# Altium footprint library Master.PcbLib: 178 footprints (part 1 of 12)
Each footprint in its own frame and in the unit in brackets; x right, y up, seen from the top. Pads: shape width x height; smd on the part's side, far side on the other; paste and mask are expansions set on the pad; w line width, h text height; cw(c..) or ccw(c..) is an arc to the next point about the centre after c.
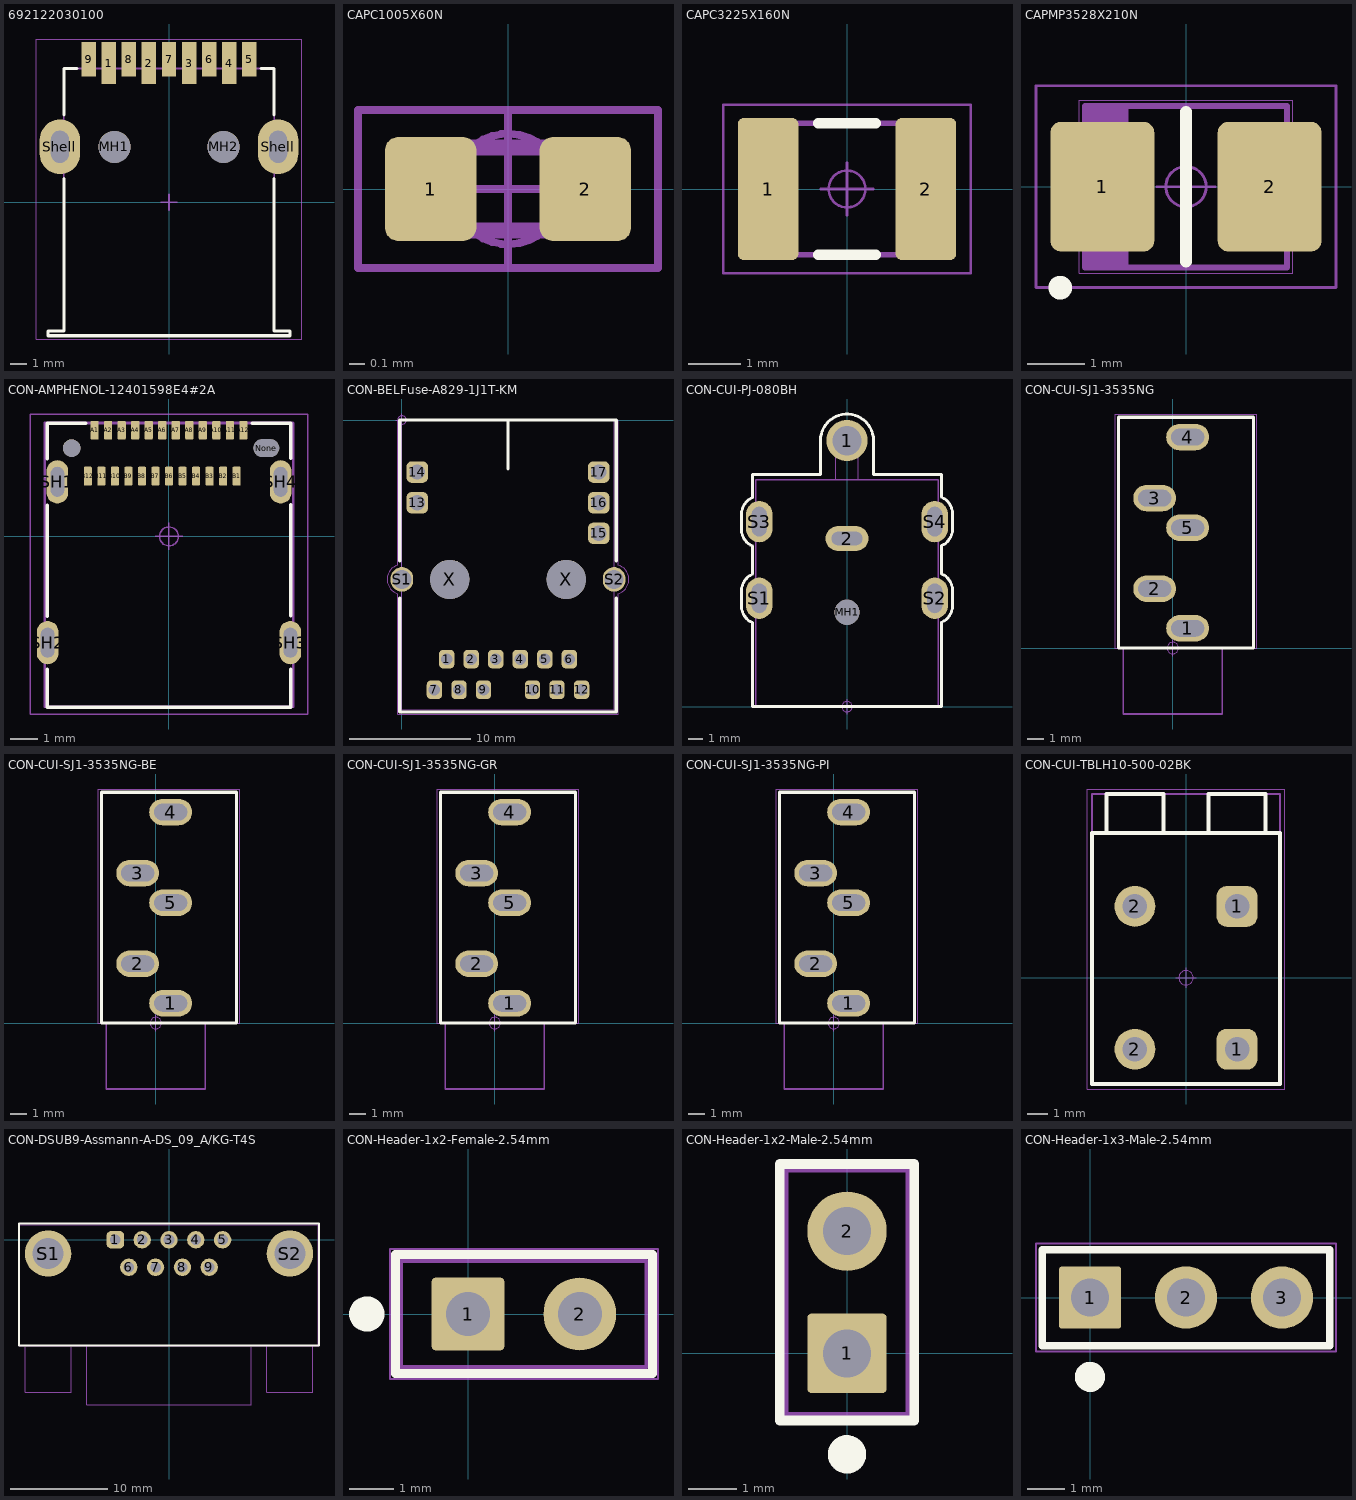
[diagram p0: the footprints below, top view; thin cyan lines are the x and y axes]

## 692122030100 [mm] "USB 3.0 Type A Horizontal SMD"
height 6.99
pads (13):
  rect 0.9x2.6 smd: 1(-3.75,8.67) 2(-1.25,8.67) 3(1.25,8.67) 4(3.75,8.67)
  rect 0.9x2.15 smd: 5(5,8.895) 6(2.5,8.895) 7(0,8.895) 8(-2.5,8.895) 9(-5,8.895)
  round 2 hole 2 unplated: MH1(-3.4,3.45) MH2(3.4,3.45)
  oval 2.52x3.4 hole 1.12 slot 2 at 90 deg: Shell(-6.8,3.45) Shell(6.8,3.45)
Top Overlay:
  lines w0.2: -6.55,1.47 -6.55,-8.03 -7.55,-8.03 -7.55,-8.33 7.55,-8.33 7.55,-8.03 6.55,-8.03 6.55,1.47 ; -6.55,5.43 -6.55,8.33 -5.75,8.33 ; 5.75,8.33 6.55,8.33 6.55,5.43
Top 3D Body:
  lines w0.1: -7.55,-8.33 7.55,-8.33 7.55,-8.03 6.55,-8.03 6.55,8.33 -6.55,8.33 -6.55,-8.03 -7.55,-8.03 -7.55,-8.33
Top Component Center:
  lines w0.1: -0.5,0 0.5,0 ; 0,-0.5 0,0.5
Top Assembly:
  lines w0.1: -5.25,8.33 -5.25,9.47 -4.75,9.47 -4.75,8.33 ; -4,8.33 -4,9.47 -3.5,9.47 -3.5,8.33 ; -2.75,8.33 -2.75,9.47 -2.25,9.47 -2.25,8.33 ; -1.5,8.33 -1.5,9.47 -1,9.47 -1,8.33 ; -0.25,8.33 -0.25,9.47 0.25,9.47 0.25,8.33 ; 1,8.33 1,9.47 1.5,9.47 1.5,8.33 ; 2.25,8.33 2.25,9.47 2.75,9.47 2.75,8.33 ; 3.5,8.33 3.5,9.47 4,9.47 4,8.33 ; 4.75,8.33 4.75,9.47 5.25,9.47 5.25,8.33 ; -7.55,-8.33 7.55,-8.33 7.55,-8.03 6.55,-8.03 6.55,8.33 -6.55,8.33 -6.55,-8.03 -7.55,-8.03 -7.55,-8.33
Top Designator:
  text ".Designator" at -3.647,-0.357 h1
Top Courtyard:
  lines w0.05: -8.26,-8.53 8.26,-8.53 8.26,10.17 -8.26,10.17 -8.26,-8.53
3D body "692122030100.stp": height 7.95, standoff -2.29, extent -7.55,-8.33 7.55,9.47

## CAPC1005X60N [mm]
pads (2):
  rrect30% 0.58x0.66 smd: 1(-0.49,0) 2(0.49,0)
Top Component Outline:
  lines w0.05: -0.95,-0.5 0.95,-0.5 0.95,0.5 -0.95,0.5 -0.95,-0.5
Top 3D Body:
  lines w0.001: -0.5,-0.25 0.5,-0.25 0.5,0.25 -0.5,0.25 -0.5,-0.25
Top Component Center:
  circle w0.05: c0,0 r0.35
  lines w0.05: -0.5,0 0.5,0 ; 0,-0.5 0,0.5
Top Dimensions:
  lines w0.1: -0.512,-0.262 0.512,-0.262 0.512,0.262 -0.512,0.262 -0.512,-0.262
Top Assembly:
  text ".Designator" at -1.575,0.8 h0.75
3D body "User Library-CAPC1005X06.step": height 0.6, standoff 0, extent -0.5,-0.25 0.5,0.25

## CAPC3225X160N [mm]
pads (2):
  rrect20% 1.15x2.7 smd: 1(-1.5,0) 2(1.5,0)
Top Overlay:
  lines w0.2: -0.55,-1.25 0.55,-1.25 ; -0.55,1.25 0.55,1.25
Top Component Outline:
  lines w0.05: -2.35,-1.6 2.35,-1.6 2.35,1.6 -2.35,1.6 -2.35,-1.6
Top 3D Body:
  lines w0.001: -1.6,-1.26 1.6,-1.26 1.6,1.26 -1.6,1.26 -1.6,-1.26
Top Component Center:
  circle w0.05: c0,0 r0.35
  lines w0.05: -0.5,0 0.5,0 ; 0,-0.5 0,0.5
Top Dimensions:
  lines w0.1: -1.6,-1.25 1.6,-1.25 1.6,1.25 -1.6,1.25 -1.6,-1.25
Top Assembly:
  text ".Designator" at -1.775,2 h0.75
3D body "User Library-CAPC3225X___.step": height 1.62, standoff 0, extent -1.6,-1.26 1.6,1.26

## CAPMP3528X210N [mm]
height 1.9
pads (2):
  rrect20% 1.8x2.25 smd: 1(-1.45,0) 2(1.45,0)
Top Overlay:
  circle w0.25: c-2.18,-1.75 r0.08
  lines w0.2: 0,-1.3 0,1.3
Top Component Outline:
  lines w0.05: -2.6,-1.75 -2.6,1.75 2.6,1.75 2.6,-1.75 -2.6,-1.75
Top 3D Body:
  lines w0.001: -1.85,-1.5 -1.85,1.5 1.85,1.5 1.85,-1.5 -1.85,-1.5
Top Component Center:
  circle w0.05: c0,0 r0.35
  lines w0.05: -0.5,0 0.5,0 ; 0,-0.5 0,0.5
Top Dimensions:
  lines w0.1: -1.65,-1.4 -1.65,1.4 ; -1.55,-1.4 -1.55,1.4 ; -1.45,-1.4 -1.45,1.4 ; -1.35,-1.4 -1.35,1.4 ; -1.25,-1.4 -1.25,1.4 ; -1.15,-1.4 -1.15,1.4 ; -1.05,-1.4 -1.05,1.4 ; -1.75,-1.4 -1.75,1.4 ; -1.75,-1.4 -1.75,1.4 ; -1.75,-1.4 1.75,-1.4 1.75,1.4 -1.75,1.4
Top Assembly:
  text ".Designator" at -1.689,-0.17 h0.75
3D body: height 1.9, standoff 0, extent -0.991,-1.5 1.85,1.5
3D body: height 1.9, standoff 0, extent -1.85,-1.5 -0.991,1.5

## CON-AMPHENOL-12401598E4#2A [mm] "USB 3.1 Gen 2, Input Output Connectors, USB type C, Receptacle, Top mount, dual-row SMT, 1.6mmPCB"
height 3.28
pads (30):
  rrect30% 0.3x0.7 smd mask+0.05: A1(-2.75,3.93) A2(-2.25,3.93) A3(-1.75,3.93) A4(-1.25,3.93) A5(-0.75,3.93) A6(-0.25,3.93) A7(0.25,3.93) A8(0.75,3.93) A9(1.25,3.93) A10(1.75,3.93) A11(2.25,3.93) A12(2.75,3.93) B1(2.5,2.23) B2(2,2.23) B3(1.5,2.23) B4(1,2.23) B5(0.5,2.23) B6(0,2.23) B7(-0.5,2.23) B8(-1,2.23) B9(-1.5,2.23) B10(-2,2.23) B11(-2.5,2.23) B12(-3,2.23)
  round 0.65 hole 0.65 unplated mask+0.05: None(-3.6,3.27)
  oval 0.95x0.65 hole 0.65 slot 0.95 at 0 deg unplated mask+0.05: None(3.6,3.27)
  oval 0.8x1.6 hole 0.5 slot 1.1 at 90 deg mask+0.05: SH1(-4.13,2.02) SH2(-4.49,-3.93) SH3(4.49,-3.93) SH4(4.13,2.02)
Top Overlay:
  lines w0.127: -4.5,-4.92 -4.5,-6.32 4.5,-6.32 4.5,-4.91 ; -4.5,-2.95 -4.5,1.15 ; -4.5,2.87 -4.5,4.18 -3.08,4.18 ; 3.08,4.18 4.5,4.18 4.5,2.89 ; 4.5,-2.94 4.5,1.17
Top Component Outline:
  lines w0.05: -5.14,-6.57 -5.14,4.53 5.14,4.53 5.14,-6.57 -5.14,-6.57
Top 3D Body:
  lines w0: -4.74,-4.23 ccw(c-4.49,-4.23) -4.24,-4.23 -4.24,-3.63 ccw(c-4.49,-3.63) -4.74,-3.63 -4.74,-4.23 ; -4.38,1.72 ccw(c-4.13,1.72) -3.88,1.72 -3.88,2.32 ccw(c-4.13,2.32) -4.38,2.32 -4.38,1.72 ; 3.88,1.72 ccw(c4.13,1.72) 4.38,1.72 4.38,2.32 ccw(c4.13,2.32) 3.88,2.32 3.88,1.72 ; 4.24,-4.23 ccw(c4.49,-4.23) 4.74,-4.23 4.74,-3.63 ccw(c4.49,-3.63) 4.24,-3.63 4.24,-4.23
  lines w0.001: -4.6,-6.305 4.6,-6.305 4.6,4.195 -4.6,4.195 -4.6,-6.305
Top Component Center:
  circle w0.05: c0,0 r0.35
  lines w0.05: -0.5,0 0.5,0 ; 0,-0.5 0,0.5
Top Dimensions:
  lines w0.1: -4.6,-6.3 -4.6,4.2 4.575,4.2 4.6,4.175 4.6,-6.3 -4.6,-6.3
Top Assembly:
  text ".Designator" at -0.454,-0.265 h0.75
3D body "12401598E4#2A--3DModel-STEP-56544.STEP": height 3.28, standoff -2.1, extent -4.6,-6.305 4.6,4.195

## CON-BELFuse-A829-1J1T-KM [mil]
pads (21):
  rrect50% 50x60 hole 38: 1(146,-779.68) 2(226,-779.68) 3(306,-779.68) 4(386,-779.68) 5(466,-779.68) 6(546,-779.68) 7(106,-879.68) 8(186,-879.68) 9(266,-879.68) 10(426,-879.68) 11(506,-879.68) 12(586,-879.68)
  rrect50% 70x70 hole 50: 13(50,-269.69) 14(50,-169.69) 15(642,-369.69) 16(642,-269.69) 17(642,-169.69)
  oval 74x80 hole 62: S1(0,-519.68) S2(692,-519.68)
  round 128 hole 128 unplated: X(156,-519.68) X(536,-519.68)
Top Overlay:
  lines w10: -6.95,-579.68 -6.95,-951.77 699.02,-951.77 699.02,-579.68 ; -6.95,-459.49 -6.95,0 699.02,0 699.02,-460 ; 346,-159.69 346,-0.06 346.06,0
Top Component Outline:
  lines w1.97: -13.78,-473.23 -13.78,0 705.91,0 705.91,-473.24 ; -13.76,-473.28 ccw(c0.2,-519.71) -13.78,-566.13 -13.78,-958.66 705.91,-958.66 705.91,-566.09 ; 705.89,-566.05 ccw(c691.8,-519.66) 705.89,-473.28
Top 3D Body:
  lines w0.04: 0,-944.88 0,0 692.13,0 692.13,-944.88 0,-944.88
Top Component Center:
  circle w1.97: c0,0 r13.78
  lines w1.97: -19.68,0 19.68,0 ; 0,-19.68 0,19.68
Top Dimensions:
  lines w3.94: 0,-944.88 0,0 692.13,0 692.13,-944.88 0,-944.88
Top Assembly:
  text ".Designator" at -61,25 h29.53
3D body "L829-1J1T-43.STEP": height 493.58, standoff -151.39, extent -54.94,-946.68 747.01,19.67

## CON-CUI-PJ-080BH [mm]
pads (7):
  round 2.8 hole 2: 1(0,18.05)
  oval 2.9x1.7 hole 0.9 slot 2.1 at 0 deg: 2(0,11.4)
  round 1.7 hole 1.7 unplated: MH1(0,6.4)
  oval 1.8x2.8 hole 1 slot 2 at 90 deg: S1(-5.95,7.35) S2(5.95,7.35) S3(-5.95,12.55) S4(5.95,12.55)
Top Overlay:
  lines w0.1: -6.399,14.182 -6.4,14.183
  lines w0.2: -6.4,5.691 cw(c-5.956,6.805) -7.156,6.805 -7.156,7.871 cw(c-5.956,7.867) -6.399,8.982 -6.4,10.891 cw(c-5.956,12.005) -7.156,12.005 -7.156,13.071 cw(c-5.956,13.067) -6.399,14.182 ; -6.4,5.693 -6.4,0 ; -6.4,14.183 -6.4,15.75 -1.8,15.75 -1.8,18.05 cw(c0,18.05) 1.8,18.05 1.8,15.75 6.4,15.75 6.4,14.209 cw(c5.956,13.095) 7.156,13.095 7.156,12.029 cw(c5.956,12.033) 6.399,10.918 6.4,9.009 cw(c5.956,7.895) 7.156,7.895 7.156,6.829 cw(c5.956,6.833) 6.399,5.718 6.4,0 ; -6.4,0 6.4,0 ; -6.4,0 6.4,0
Top Component Outline:
  lines w0.05: -6.4,5.691 cw(c-5.956,6.805) -7.156,6.805 -7.156,7.871 cw(c-5.956,7.867) -6.399,8.982 -6.4,10.891 cw(c-5.956,12.005) -7.156,12.005 -7.156,13.071 cw(c-5.956,13.067) -6.399,14.182 -6.399,15.747 -6.401,15.748 -1.803,15.748 -1.803,18.05 ; -6.4,5.693 -6.4,0 6.4,0 6.4,5.794 ; -1.8,18.05 cw(c0,18.05) 1.8,18.05 1.8,15.75 6.4,15.75 6.4,14.209 cw(c5.956,13.095) 7.156,13.095 7.156,12.029 cw(c5.956,12.033) 6.399,10.918 6.4,9.009 cw(c5.956,7.895) 7.156,7.895 7.156,6.829 cw(c5.956,6.833) 6.399,5.718
Top 3D Body:
  lines w0.001: -0.75,15.4 -0.75,15.425 -0.75,18.8 0.75,18.8 0.75,15.425 0.75,15.4 ; -6.2,0 -6.2,15.4 6.2,15.4 6.2,0 -6.2,0
Top Component Center:
  circle w0.05: c0,0 r0.35
  lines w0.05: -0.5,0 0.5,0 ; 0,-0.5 0,0.5
Top Dimensions:
  lines w0.1: -6.2,0 -6.2,15.4 6.2,15.4 6.2,0 -6.2,0
Top Assembly:
  text ".Designator" at -1.829,-0.965 h0.75
3D body "CUI_PJ-080BH.step": height 13.4, standoff -2.2, extent -6.3,0 6.3,18.8

## CON-CUI-SJ1-3535NG [mm]
pads (5):
  oval 2.6x1.6 hole 1 slot 2 at 0 deg: 1(0.9,1.2) 2(-1.1,3.6) 3(-1.1,9.1) 4(0.9,12.8) 5(0.9,7.3)
Top Overlay:
  lines w0.2: -3.3,0 4.9,0 4.9,14 -3.3,14 -3.3,0
Top Component Outline:
  lines w0.05: -3,0 3,0 ; -3,0 -3,-4 3,-4 3,0 ; -3,0 -3.5,0 -3.5,14.2 5.1,14.2 5.1,0 3,0
Top 3D Body:
  lines w0.01: -3,0 -3,-4 3,-4 3,0 ; -3.3,0 -3.3,14 4.9,14 4.9,0 -3.3,0
Top Component Center:
  circle w0.05: c0,0 r0.35
  lines w0.05: -0.5,0 0.5,0 ; 0,-0.5 0,0.5
Top Dimensions:
  lines w0.1: -3,0 -3,-4 3,-4 3,0 ; -3.3,0 4.9,0 4.9,14 -3.3,14 -3.3,0
Top Assembly:
  text ".Designator" at -1.6,14.402 h0.75
3D body "CUI_DEVICES_SJ1-3535NG.step": height 12.31, standoff -3.29, extent -3.3,-4.05 4.9,14

## CON-CUI-SJ1-3535NG-BE [mm]
pads (5):
  oval 2.6x1.6 hole 1 slot 2 at 0 deg: 1(0.9,1.2) 2(-1.1,3.6) 3(-1.1,9.1) 4(0.9,12.8) 5(0.9,7.3)
Top Overlay:
  lines w0.2: -3.3,0 4.9,0 4.9,14 -3.3,14 -3.3,0
Top Component Outline:
  lines w0.05: -3,0 -3,-4 3,-4 3,0 ; 3,0 -2.8,0 -3.5,0 -3.5,14.2 5.1,14.2 5.1,0 3,0
Top 3D Body:
  lines w0.01: -3,0 -3,-4 3,-4 3,0 ; -3.3,0 -3.3,14 4.9,14 4.9,0 -3.3,0
Top Component Center:
  circle w0.05: c0,0 r0.35
  lines w0.05: -0.5,0 0.5,0 ; 0,-0.5 0,0.5
Top Dimensions:
  lines w0.1: -3,0 -3,-4 3,-4 3,0 ; -3.3,0 4.9,0 4.9,14 -3.3,14 -3.3,0
Top Assembly:
  text ".Designator" at -1.6,14.402 h0.75
3D body "CUI_SJ1-3535NG-BE.step": height 12.4, standoff -3.2, extent -3.3,-4.05 4.9,14

## CON-CUI-SJ1-3535NG-GR [mm]
pads (5):
  oval 2.6x1.6 hole 1 slot 2 at 0 deg: 1(0.9,1.2) 2(-1.1,3.6) 3(-1.1,9.1) 4(0.9,12.8) 5(0.9,7.3)
Top Overlay:
  lines w0.2: -3.3,0 4.9,0 4.9,14 -3.3,14 -3.3,0
Top Component Outline:
  lines w0.05: -3,0 3,0 ; -3,0 -3,-4 3,-4 3,0 ; -3,0 -3.5,0 -3.5,14.2 5.1,14.2 5.1,0 3,0
Top 3D Body:
  lines w0.01: -3,0 -3,-4 3,-4 3,0 ; -3.3,0 -3.3,14 4.9,14 4.9,0 -3.3,0
Top Component Center:
  circle w0.05: c0,0 r0.35
  lines w0.05: -0.5,0 0.5,0 ; 0,-0.5 0,0.5
Top Dimensions:
  lines w0.1: -3,0 -3,-4 3,-4 3,0 ; -3.3,0 4.9,0 4.9,14 -3.3,14 -3.3,0
Top Assembly:
  text ".Designator" at -1.6,14.402 h0.75
3D body "CUI_SJ1-3535NG-GR.step": height 12.4, standoff -3.2, extent -3.3,-4.05 4.9,14

## CON-CUI-SJ1-3535NG-PI [mm]
pads (5):
  oval 2.6x1.6 hole 1 slot 2 at 0 deg: 1(0.9,1.2) 2(-1.1,3.6) 3(-1.1,9.1) 4(0.9,12.8) 5(0.9,7.3)
Top Overlay:
  lines w0.2: -3.3,0 4.9,0 4.9,14 -3.3,14 -3.3,0
Top Component Outline:
  lines w0.05: -3,0 -3.5,0 -3.5,14.2 5.1,14.2 5.1,0 3,0 ; -3,0 -3,-4 3,-4 3,0 ; -3,0 3,0
Top 3D Body:
  lines w0.01: -3,0 -3,-4 3,-4 3,0 ; -3.3,0 -3.3,14 4.9,14 4.9,0 -3.3,0
Top Component Center:
  circle w0.05: c0,0 r0.35
  lines w0.05: -0.5,0 0.5,0 ; 0,-0.5 0,0.5
Top Dimensions:
  lines w0.1: -3,0 -3,-4 3,-4 3,0 ; -3.3,0 4.9,0 4.9,14 -3.3,14 -3.3,0
Top Assembly:
  text ".Designator" at -1.6,14.402 h0.75
3D body "CUI_SJ1-3535NG-PI.step": height 12.4, standoff -3.2, extent -3.3,-4.05 4.9,14

## CON-CUI-TBLH10-500-02BK [mm] "TBLH10-500 TERMINAL BLOCK"
height 8.5
pads (4):
  rrect50% 2x2 hole 1.2: 1(2.5,-3.5) 1(2.5,3.5)
  round 2 hole 1.2: 2(-2.5,-3.5) 2(-2.5,3.5)
Top Overlay:
  lines w0.2: -3.9,7.1 -3.9,9 -1.1,9 -1.1,7.1 ; 1.1,7.1 1.1,9 3.9,9 3.9,7.1 ; -4.6,-5.2 4.6,-5.2 4.6,7.1 -4.6,7.1 -4.6,-5.2
Top Component Outline:
  lines w0.05: -4.85,-5.45 4.85,-5.45 4.85,9.25 -4.85,9.25 -4.85,-5.45
Top 3D Body:
  lines w0.001: -4.6,-5.2 4.6,-5.2 4.6,9 -4.6,9 -4.6,-5.2
Top Component Center:
  circle w0.05: c0,0 r0.35
  lines w0.05: -0.5,0 0.5,0 ; 0,-0.5 0,0.5
Top Dimensions:
  lines w0.1: -4.6,-5.2 4.6,-5.2 4.6,9 -4.6,9 -4.6,-5.2
Top Assembly:
  text ".Designator" at -1.689,-0.17 h0.75
3D body "CUI_DEVICES_TBLH10-500-02BK.step": height 8.51, standoff -3.49, extent -4.6,-5.2 4.6,9

## CON-DSUB9-Assmann-A-DS_09_A/KG-T4S [mm]
pads (11):
  rrect50% 1.8x1.8 hole 1.1: 1(-5.54,0)
  round 1.8 hole 1.1: 2(-2.77,0) 3(0,0) 4(2.77,0) 5(5.54,0) 6(-4.155,-2.84) 7(-1.385,-2.84) 8(1.385,-2.84) 9(4.155,-2.84)
  round 4.8 hole 3.2: S1(-12.495,-1.42) S2(12.495,-1.42)
Top Overlay:
  lines w0.2: -15.5,-10.94 15.5,-10.94 15.5,1.7 -15.5,1.7 -15.5,-10.94
Top Component Outline:
  lines w0.05: -14.87,-10.94 -14.87,-15.74 -10.12,-15.74 -10.12,-10.94 ; -8.48,-10.94 -8.48,-17.04 8.48,-17.04 8.48,-10.94 ; 10.12,-10.94 10.12,-15.74 14.87,-15.74 14.87,-10.94 ; -15.494,-10.94 -15.494,1.7 15.494,1.7 15.494,-10.94 -15.494,-10.94
Top 3D Body:
  lines w0.001: -14.87,-10.94 -14.87,-15.74 -10.12,-15.74 -10.12,-10.94 ; -8.48,-10.94 -8.48,-17.04 8.48,-17.04 8.48,-10.94 ; 10.12,-10.94 10.12,-15.74 14.87,-15.74 14.87,-10.94 ; -15.405,-10.94 15.405,-10.94 15.405,1.56 -15.405,1.56 -15.405,-10.94
Top Component Center:
  circle w0.05: c0,0 r0.35
  lines w0.05: -0.5,0 0.5,0 ; 0,-0.5 0,0.5
Top Dimensions:
  lines w0.1: -14.87,-10.94 -14.87,-15.74 -10.12,-15.74 -10.12,-10.94 ; -8.48,-10.94 -8.48,-17.04 8.48,-17.04 8.48,-10.94 ; 10.12,-10.94 10.12,-15.74 14.87,-15.74 14.87,-10.94 ; -15.405,-10.94 15.405,-10.94 15.405,1.56 -15.405,1.56 -15.405,-10.94
Top Assembly:
  text ".Designator" at 12.167,2.007 h0.75
3D body "connector_a-ds_09_a_kg-t2.stp": height 12.55, standoff -4.33, extent -15.405,-17.04 15.405,1.56

## CON-Header-1x2-Female-2.54mm [mm] "Header female, 1x2 Pins, 2.54 mm pitch"
height 8.51
pads (2):
  rrect10% 1.65x1.65 hole 1: 1(0,0)
  round 1.65 hole 1: 2(2.54,0)
Top Overlay:
  circle w0.4: c-2.3,0 r0.2
  lines w0.2: -1.65,-1.355 -1.65,1.355 4.191,1.355 4.191,-1.355 -1.65,-1.355
Top Component Outline:
  lines w0.05: -1.775,-1.48 -1.775,1.48 4.318,1.48 4.318,-1.48 -1.775,-1.48
Top 3D Body:
  lines w0.01: -1.525,-1.205 4.064,-1.205 4.064,1.205 -1.525,1.205 -1.525,-1.205
Top Component Center:
  circle w0.05: c0,0 r0.35
  lines w0.05: -0.5,0 0.5,0 ; 0,-0.5 0,0.5
Top Dimensions:
  lines w0.1: -1.525,-1.205 4.064,-1.205 4.064,1.205 -1.525,1.205 -1.525,-1.205
Top Assembly:
  text ".Designator" at -0.406,1.702 h0.75
3D body "Samtec-SSW-102-01-G-S.step": height 8.51, standoff -2.64, extent -1.524,-1.206 4.064,1.207

## CON-Header-1x2-Male-2.54mm [mm]
pads (2):
  rrect10% 1.65x1.65 hole 1: 1(0,0)
  round 1.65 hole 1: 2(0,2.54)
Top Overlay:
  circle w0.4: c0,-2.1 r0.2
  lines w0.2: -1.395,-1.395 -1.395,3.935 1.395,3.935 1.395,-1.395 -1.395,-1.395
Top Component Outline:
  lines w0.05: -1.37,-1.37 1.37,-1.37 1.37,3.91 -1.37,3.91 -1.37,-1.37
Top 3D Body:
  lines w0.001: -1.27,-1.27 -1.27,3.81 1.27,3.81 1.27,-1.27 -1.27,-1.27
Top Component Center:
  circle w0.05: c0,0 r0.35
  lines w0.05: -0.5,0 0.5,0 ; 0,-0.5 0,0.5
Top Dimensions:
  lines w0.1: -1.27,-1.27 1.27,-1.27 1.27,3.81 -1.27,3.81 -1.27,-1.27
Top Assembly:
  text ".Designator" at -1.689,1.1 h0.75
3D body "Samtec-TSW-101-07-G-D.step": height 8.4, standoff -2.52, extent -1.27,-1.27 1.27,3.81

## CON-Header-1x3-Male-2.54mm [mm]
pads (3):
  rrect10% 1.65x1.65 hole 1: 1(0,0)
  round 1.65 hole 1: 2(2.54,0) 3(5.08,0)
Top Overlay:
  circle w0.4: c0,-2.1 r0.2
  lines w0.2: -1.27,-1.27 -1.27,1.27 6.35,1.27 6.35,-1.27 -1.27,-1.27
Top Component Outline:
  lines w0.05: -1.43,-1.43 -1.43,1.43 6.51,1.43 6.51,-1.43 -1.43,-1.43
Top 3D Body:
  lines w0.001: -1.27,-1.27 6.35,-1.27 6.35,1.27 -1.27,1.27 -1.27,-1.27
Top Component Center:
  circle w0.05: c0,0 r0.35
  lines w0.05: -0.5,0 0.5,0 ; 0,-0.5 0,0.5
Top Dimensions:
  lines w0.1: -1.27,-1.27 6.35,-1.27 6.35,1.27 -1.27,1.27 -1.27,-1.27
Top Assembly:
  text ".Designator" at 0.975,1.8 h0.75
3D body "Samtec-TSW-103-07-G-S, Jumper with 3 pins, male.step": height 8.4, standoff -2.52, extent -1.27,-1.27 6.35,1.27